# Altium footprint library LDO-DC_DC.PcbLib: 41 footprints (part 1 of 3)
Each footprint in its own frame and in the unit in brackets; x right, y up, seen from the top. Pads: shape width x height; smd on the part's side, far side on the other; paste and mask are expansions set on the pad; w line width, h text height; cw(c..) or ccw(c..) is an arc to the next point about the centre after c.
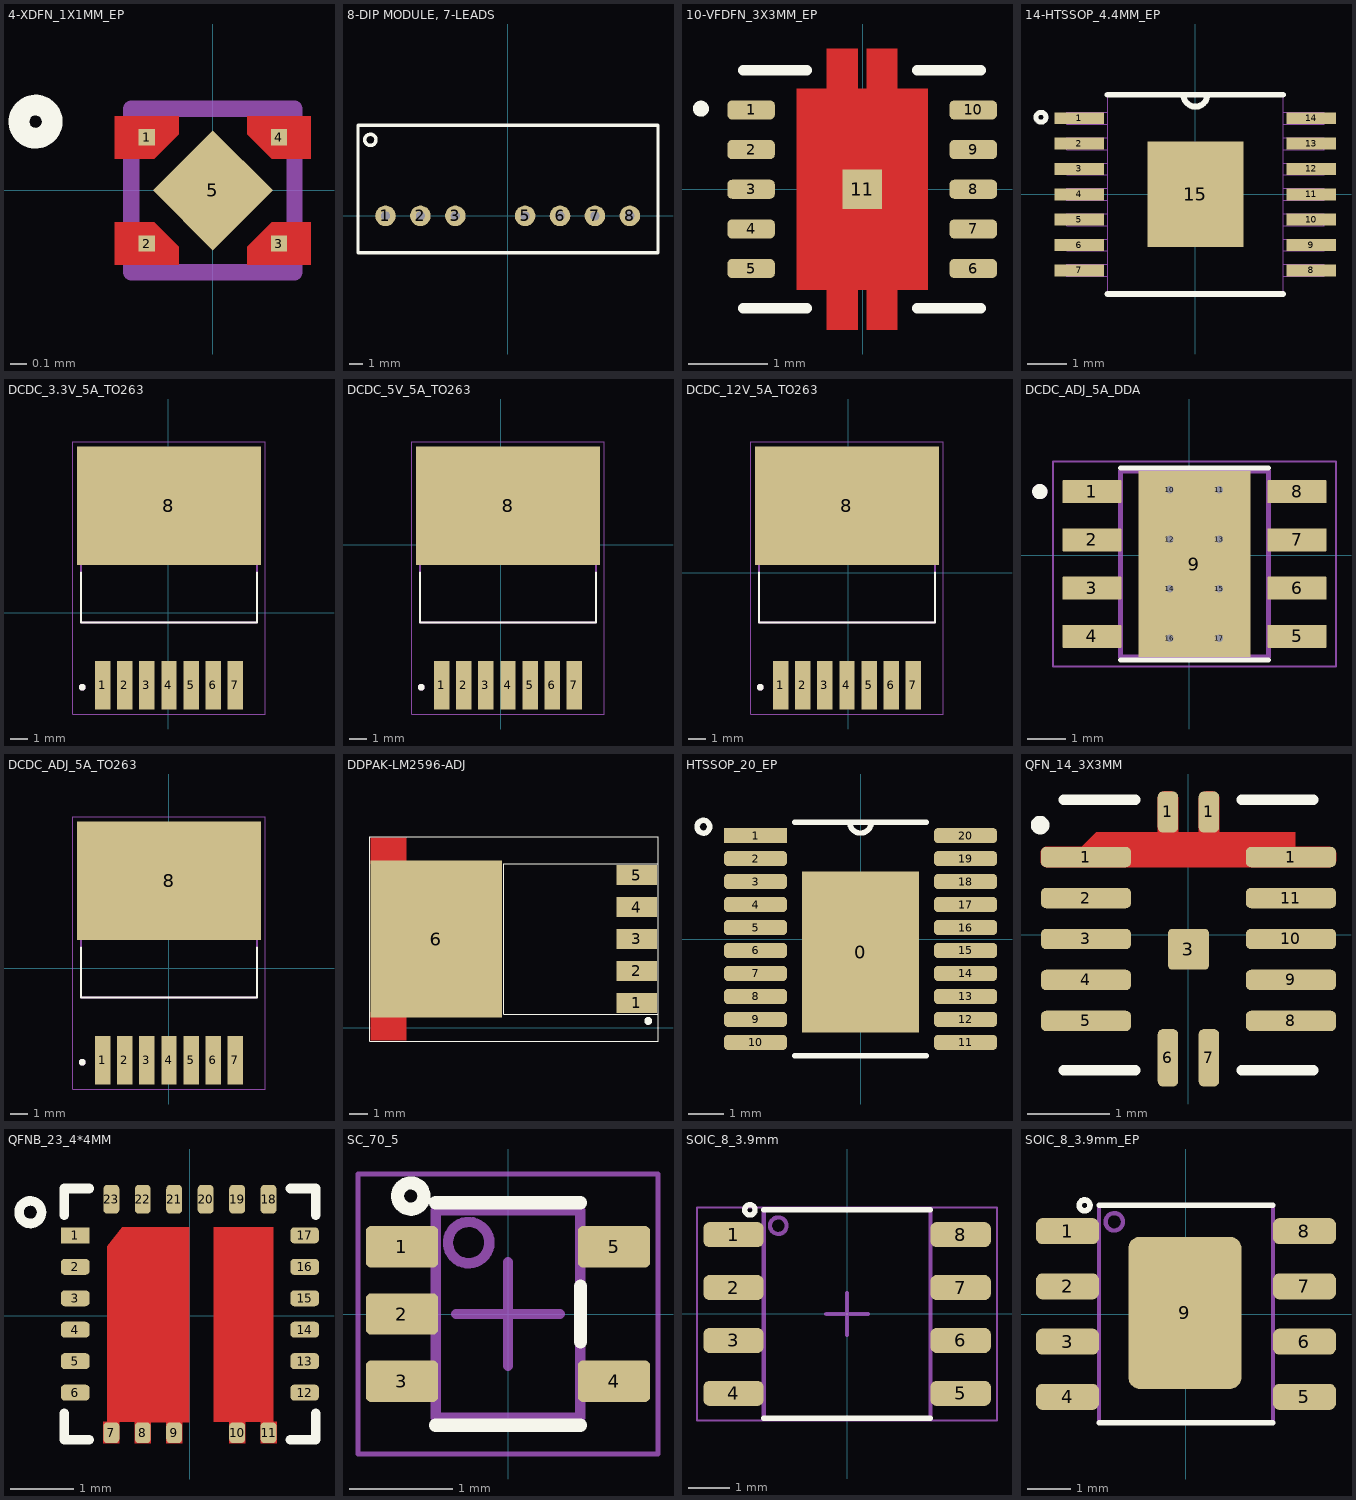
[diagram p0: the footprints below, top view; thin cyan lines are the x and y axes]

## 4-XDFN_1X1MM_EP [mm] "20220103 / A-F.Romo"
pads (5):
  rect 0.1x0.1 smd paste-1 mask+0: 1(-0.405,0.325) 2(-0.405,-0.325) 3(0.405,-0.325) 4(0.405,0.325)
  rect 0.52x0.52 smd rot 45: 5(0,0)
Top Layer:
  region: -0.21,0.345 -0.36,0.195 -0.6,0.195 -0.6,0.455 -0.21,0.455
  region: -0.21,-0.345 -0.21,-0.455 -0.6,-0.455 -0.6,-0.195 -0.36,-0.195
  region: 0.6,-0.455 0.21,-0.455 0.21,-0.345 0.36,-0.195 0.6,-0.195
  region: 0.6,0.195 0.36,0.195 0.21,0.345 0.21,0.455 0.6,0.455
Top Overlay:
  circle w0.127: c-1.085,0.421 r0.102
Top Paste:
  region: -0.21,0.345 -0.36,0.195 -0.6,0.195 -0.6,0.455 -0.21,0.455
  region: -0.21,-0.345 -0.21,-0.455 -0.6,-0.455 -0.6,-0.195 -0.36,-0.195
  region: 0.6,-0.455 0.21,-0.455 0.21,-0.345 0.36,-0.195 0.6,-0.195
  region: 0.6,0.195 0.36,0.195 0.21,0.345 0.21,0.455 0.6,0.455
Top Solder:
  region: -0.16,0.32 -0.335,0.145 -0.65,0.145 -0.65,0.505 -0.16,0.505
  region: -0.16,-0.32 -0.16,-0.505 -0.65,-0.505 -0.65,-0.145 -0.335,-0.145
  region: 0.65,-0.505 0.16,-0.505 0.16,-0.32 0.335,-0.145 0.65,-0.145
  region: 0.65,0.145 0.335,0.145 0.16,0.32 0.16,0.505 0.65,0.505
Mechanical 1:
  lines w0.1: -0.5,-0.5 0.5,-0.5 0.5,0.5 -0.5,0.5 -0.5,-0.5
3D body "step_temp.STEP": height 0.38, standoff -0.05, extent -0.5,-0.5 0.5,0.5

## 8-DIP MODULE, 7-LEADS [mm] "/20220607/F-A.Ospina"
pads (7):
  round 1.5 hole 0.635: 1(-8.89,0) 2(-6.35,0) 3(-3.81,0) 5(1.27,0) 6(3.81,0) 7(6.35,0) 8(8.89,0)
Top Overlay:
  circle w0.254: c-9.988,5.53 r0.408
  lines w0.254: -10.89,-2.7 -10.89,6.6 10.91,6.6 ; -10.87,-2.69 10.93,-2.69 ; 10.94,-2.69 10.94,6.61
3D body: height 2.61, standoff -0.39, extent 8.69,-0.2 9.088,0.2
3D body: height 11.2, standoff 0, extent -10.915,-2.722 10.878,6.575
3D body: height 2.61, standoff -0.39, extent 6.15,-0.2 6.548,0.2
3D body: height 2.61, standoff -0.39, extent 3.61,-0.2 4.008,0.2
3D body: height 2.61, standoff -0.39, extent 1.07,-0.2 1.468,0.2
3D body: height 2.61, standoff -0.39, extent -4.01,-0.2 -3.612,0.2
3D body: height 2.61, standoff -0.39, extent -6.55,-0.2 -6.152,0.2
3D body: height 2.61, standoff -0.39, extent -9.09,-0.2 -8.692,0.2

## 10-VFDFN_3X3MM_EP [mm] "/20210803/J-E.Pachon"
pads (11):
  rrect50% 0.6x0.24 smd: 1(-1.41,1) 2(-1.41,0.5) 3(-1.41,0) 4(-1.41,-0.5) 5(-1.41,-1) 6(1.39,-1) 7(1.39,-0.5) 8(1.39,0) 9(1.39,0.5) 10(1.39,1)
  rect 0.5x0.5 smd paste-1 mask+0: 11(-0.01,0)
Top Layer:
  region: 0.435,1.27 0.815,1.27 0.815,-1.27 0.435,-1.27 0.435,-1.77 0.045,-1.77 0.045,-1.27 -0.065,-1.27 -0.065,-1.77 -0.455,-1.77 -0.455,-1.27 -0.835,-1.27 -0.835,1.27 -0.455,1.27 -0.455,1.77 -0.065,1.77 -0.065,1.27 0.045,1.27 0.045,1.77 0.435,1.77
  region: 0.365,1.2 0.815,1.2 0.815,-1.2 0.365,-1.2 0.365,-1.7 0.115,-1.7 0.115,-1.2 -0.135,-1.2 -0.135,-1.7 -0.385,-1.7 -0.385,-1.2 -0.835,-1.2 -0.835,1.2 -0.385,1.2 -0.385,1.7 -0.135,1.7 -0.135,1.2 0.115,1.2 0.115,1.7 0.365,1.7
Top Overlay:
  circle w0.1: c-2.042,1.016 r0.05
  lines w0.127: -1.51,-1.5 -0.705,-1.5 ; -1.51,1.5 -0.705,1.5 ; 0.685,-1.5 1.49,-1.5 ; 0.685,1.5 1.49,1.5
Top Paste:
  region: -0.135,1.36 -0.385,1.36 -0.385,1.7 -0.135,1.7
  region: 0.365,1.36 0.115,1.36 0.115,1.7 0.365,1.7
  region: -0.135,-1.7 -0.385,-1.7 -0.385,-1.36 -0.135,-1.36
  region: 0.365,-1.7 0.115,-1.7 0.115,-1.36 0.365,-1.36
  region: 0.74,0.1 -0.76,0.1 -0.76,1.16 0.74,1.16
  region: 0.74,-1.16 -0.76,-1.16 -0.76,-0.1 0.74,-0.1
Top Solder:
  region: 0.431,1.277 0.811,1.277 0.811,-1.263 0.431,-1.263 0.431,-1.763 0.041,-1.763 0.041,-1.263 -0.069,-1.263 -0.069,-1.763 -0.459,-1.763 -0.459,-1.263 -0.839,-1.263 -0.839,1.277 -0.459,1.277 -0.459,1.777 -0.069,1.777 -0.069,1.277 0.041,1.277 0.041,1.777 0.431,1.777
3D body "TPS61087DSCR--3DModel-STEP-56544.STEP": height 0.81, standoff 0.01, extent -1.51,-1.5 1.49,1.5

## 14-HTSSOP_4.4MM_EP [mil] "20220111/J-E.Pachon"
pads (15):
  rect 50x12 smd: 1(-117,76.77) 2(-117,51.18) 3(-117,25.59) 4(-117,0) 5(-117,-25.59) 6(-117,-51.18) 7(-117,-76.77) 8(117,-76.77) 9(117,-51.18) 10(117,-25.59) 11(117,0) 12(117,25.59) 13(117,51.18) 14(117,76.77)
  rect 96.85x106.3 smd: 15(0,0)
Top Layer:
  region: 0,45.47
  region: 0,-45.47
Top Overlay:
  circle w5: c-155.91,77.77 r5
  lines w6: -88.5,-100.5 88.5,-100.5 ; -88.5,100.5 88.5,100.5 ; -12,100.5 ccw(c0,100.5) 12,100.5
Top Solder:
  region: 0,45.47
  region: 0,-45.47
Mechanical 13:
  lines w0: -12,100.5 ccw(c0,100.5) 12,100.5
  lines w1: -130,-82.77 -130,-70.77 -88.5,-70.77 -88.5,-82.77 -130,-82.77 ; -130,-57.18 -130,-45.18 -88.5,-45.18 -88.5,-57.18 -130,-57.18 ; -130,-31.59 -130,-19.59 -88.5,-19.59 -88.5,-31.59 -130,-31.59 ; -130,-6 -130,6 -88.5,6 -88.5,-6 -130,-6 ; -130,19.59 -130,31.59 -88.5,31.59 -88.5,19.59 -130,19.59 ; -130,45.18 -130,57.18 -88.5,57.18 -88.5,45.18 -130,45.18 ; -130,70.77 -130,82.77 -88.5,82.77 -88.5,70.77 -130,70.77 ; -88.5,-100.5 88.5,-100.5 88.5,100.5 -88.5,100.5 -88.5,-100.5 ; 88.5,-82.77 88.5,-70.77 130,-70.77 130,-82.77 88.5,-82.77 ; 88.5,-57.18 88.5,-45.18 130,-45.18 130,-57.18 88.5,-57.18 ; 88.5,-31.59 88.5,-19.59 130,-19.59 130,-31.59 88.5,-31.59 ; 88.5,-6 88.5,6 130,6 130,-6 88.5,-6 ; 88.5,19.59 88.5,31.59 130,31.59 130,19.59 88.5,19.59 ; 88.5,45.18 88.5,57.18 130,57.18 130,45.18 88.5,45.18 ; 88.5,70.77 88.5,82.77 130,82.77 130,70.77 88.5,70.77
3D body "PWP14.step": height 67.09, standoff 0, extent -130,-100.52 130,100.5

## DCDC_3.3V_5A_TO263 [mm]
pads (8):
  rect 0.89x2.79 smd: 1(-3.758,-4.194) 2(-2.488,-4.194) 3(-1.218,-4.194) 4(0.052,-4.194) 5(1.322,-4.194) 6(2.592,-4.194) 7(3.862,-4.194)
  rect 10.58x6.84 smd paste-6: 8(0.052,6.156)
Top Overlay:
  circle w0.2: c-4.948,-4.304 r0.1
  lines w0.127: -5.028,2.296 -5.028,-0.579 5.132,-0.579 5.132,2.296
Top Paste:
  region: -0.198,6.911 -1.458,6.911 -1.458,8.821 -0.198,8.821
  region: -0.198,3.491 -1.458,3.491 -1.458,5.401 -0.198,5.401
  region: 1.562,6.911 0.302,6.911 0.302,8.821 1.562,8.821
  region: 1.562,3.491 0.302,3.491 0.302,5.401 1.562,5.401
  region: -1.958,6.911 -3.218,6.911 -3.218,8.821 -1.958,8.821
  region: -3.718,6.911 -4.978,6.911 -4.978,8.821 -3.718,8.821
  region: -1.958,3.491 -3.218,3.491 -3.218,5.401 -1.958,5.401
  region: -3.718,3.491 -4.978,3.491 -4.978,5.401 -3.718,5.401
  region: 3.322,3.491 2.062,3.491 2.062,5.401 3.322,5.401
  region: 3.322,6.911 2.062,6.911 2.062,8.821 3.322,8.821
  region: 5.082,6.911 3.822,6.911 3.822,8.821 5.082,8.821
  region: 5.082,3.491 3.822,3.491 3.822,5.401 5.082,5.401
Mechanical 13:
  circle w0.2: c-4.948,-4.304 r0.1
  lines w0.127: -5.028,-0.579 5.132,-0.579 5.132,8.061 -5.028,8.061 -5.028,-0.579
Mechanical 15:
  lines w0.05: -5.488,-5.844 5.592,-5.844 5.592,9.836 -5.488,9.836 -5.488,-5.844
3D body "step_temp.STEP": height 4.65, standoff -0.3, extent -4.996,-5.624 5.1,9.616

## DCDC_5V_5A_TO263 [mm]
pads (8):
  rect 0.89x2.79 smd: 1(-3.388,-8.095) 2(-2.118,-8.095) 3(-0.848,-8.095) 4(0.422,-8.095) 5(1.692,-8.095) 6(2.962,-8.095) 7(4.232,-8.095)
  rect 10.58x6.84 smd paste-6: 8(0.422,2.255)
Top Overlay:
  circle w0.2: c-4.578,-8.205 r0.1
  lines w0.127: -4.658,-1.605 -4.658,-4.48 5.502,-4.48 5.502,-1.605
Top Paste:
  region: 5.452,-0.41 4.192,-0.41 4.192,1.5 5.452,1.5
  region: 5.452,3.01 4.192,3.01 4.192,4.92 5.452,4.92
  region: 3.692,3.01 2.432,3.01 2.432,4.92 3.692,4.92
  region: 3.692,-0.41 2.432,-0.41 2.432,1.5 3.692,1.5
  region: -3.348,-0.41 -4.608,-0.41 -4.608,1.5 -3.348,1.5
  region: -1.588,-0.41 -2.848,-0.41 -2.848,1.5 -1.588,1.5
  region: -3.348,3.01 -4.608,3.01 -4.608,4.92 -3.348,4.92
  region: -1.588,3.01 -2.848,3.01 -2.848,4.92 -1.588,4.92
  region: 1.932,-0.41 0.672,-0.41 0.672,1.5 1.932,1.5
  region: 1.932,3.01 0.672,3.01 0.672,4.92 1.932,4.92
  region: 0.172,-0.41 -1.088,-0.41 -1.088,1.5 0.172,1.5
  region: 0.172,3.01 -1.088,3.01 -1.088,4.92 0.172,4.92
Mechanical 13:
  circle w0.2: c-4.578,-8.205 r0.1
  lines w0.127: -4.658,-4.48 -4.658,4.16 5.502,4.16 5.502,-4.48 -4.658,-4.48
Mechanical 15:
  lines w0.05: -5.118,-9.745 -5.118,5.935 5.962,5.935 5.962,-9.745 -5.118,-9.745
3D body "step_temp.STEP": height 4.65, standoff -0.3, extent -4.626,-9.525 5.47,5.715

## DCDC_12V_5A_TO263 [mm]
pads (8):
  rect 0.89x2.79 smd: 1(-3.876,-6.503) 2(-2.606,-6.503) 3(-1.336,-6.503) 4(-0.066,-6.503) 5(1.204,-6.503) 6(2.474,-6.503) 7(3.744,-6.503)
  rect 10.58x6.84 smd paste-6: 8(-0.066,3.847)
Top Overlay:
  circle w0.2: c-5.066,-6.613 r0.1
  lines w0.127: -5.146,-0.013 -5.146,-2.888 5.014,-2.888 5.014,-0.013
Top Paste:
  region: 4.964,1.182 3.704,1.182 3.704,3.092 4.964,3.092
  region: 4.964,4.602 3.704,4.602 3.704,6.512 4.964,6.512
  region: 3.204,4.602 1.944,4.602 1.944,6.512 3.204,6.512
  region: 3.204,1.182 1.944,1.182 1.944,3.092 3.204,3.092
  region: -3.836,1.182 -5.096,1.182 -5.096,3.092 -3.836,3.092
  region: -2.076,1.182 -3.336,1.182 -3.336,3.092 -2.076,3.092
  region: -3.836,4.602 -5.096,4.602 -5.096,6.512 -3.836,6.512
  region: -2.076,4.602 -3.336,4.602 -3.336,6.512 -2.076,6.512
  region: 1.444,1.182 0.184,1.182 0.184,3.092 1.444,3.092
  region: 1.444,4.602 0.184,4.602 0.184,6.512 1.444,6.512
  region: -0.316,1.182 -1.576,1.182 -1.576,3.092 -0.316,3.092
  region: -0.316,4.602 -1.576,4.602 -1.576,6.512 -0.316,6.512
Mechanical 13:
  circle w0.2: c-5.066,-6.613 r0.1
  lines w0.127: -5.146,-2.888 -5.146,5.752 5.014,5.752 5.014,-2.888 -5.146,-2.888
Mechanical 15:
  lines w0.05: -5.606,-8.153 -5.606,7.527 5.474,7.527 5.474,-8.153 -5.606,-8.153
3D body "step_temp.STEP": height 4.65, standoff -0.3, extent -5.114,-7.933 4.982,7.307

## DCDC_ADJ_5A_DDA [mm]
pads (17):
  rrect5% 1.55x0.6 smd mask+0: 1(-2.565,1.671) 2(-2.565,0.401) 3(-2.565,-0.869) 4(-2.565,-2.139) 5(2.835,-2.139) 6(2.835,-0.869) 7(2.835,0.401) 8(2.835,1.671)
  rect 2.95x4.9 smd paste-3 mask+0: 9(0.135,-0.234)
  round 0.3 hole 0.2: 10(-0.515,1.716) 11(0.785,1.716) 12(-0.515,0.416) 13(0.785,0.416) 14(-0.515,-0.884) 15(0.785,-0.884) 16(-0.515,-2.184) 17(0.785,-2.184)
Top Overlay:
  circle w0.2: c-3.935,1.671 r0.1
  lines w0.127: -1.815,-2.759 2.085,-2.759 ; -1.815,2.291 2.085,2.291
Top Paste:
  region: 1.49,-1.934 -1.22,-1.934 -1.22,1.466 1.49,1.466
Top Solder:
  drawing of 9 lines, arcs and shapes, not listed
Mechanical 13:
  circle w0.2: c-3.935,1.671 r0.1
  lines w0.127: -1.815,-2.684 -1.815,2.216 2.085,2.216 2.085,-2.684 -1.815,-2.684
Mechanical 15:
  lines w0.05: -3.59,-2.934 -3.59,2.466 3.86,2.466 3.86,-2.934 -3.59,-2.934
3D body "step_temp.STEP": height 1.7, standoff 0, extent -2.865,-2.684 3.135,2.216

## DCDC_ADJ_5A_TO263 [mm]
pads (8):
  rect 0.89x2.79 smd: 1(-3.783,-5.32) 2(-2.513,-5.32) 3(-1.243,-5.32) 4(0.027,-5.32) 5(1.297,-5.32) 6(2.567,-5.32) 7(3.837,-5.32)
  rect 10.58x6.84 smd paste-6: 8(0.027,5.03)
Top Overlay:
  circle w0.2: c-4.973,-5.43 r0.1
  lines w0.127: -5.053,1.17 -5.053,-1.705 5.107,-1.705 5.107,1.17
Top Paste:
  region: 5.057,2.365 3.797,2.365 3.797,4.275 5.057,4.275
  region: 5.057,5.785 3.797,5.785 3.797,7.695 5.057,7.695
  region: 3.297,5.785 2.037,5.785 2.037,7.695 3.297,7.695
  region: 3.297,2.365 2.037,2.365 2.037,4.275 3.297,4.275
  region: -3.743,2.365 -5.003,2.365 -5.003,4.275 -3.743,4.275
  region: -1.983,2.365 -3.243,2.365 -3.243,4.275 -1.983,4.275
  region: -3.743,5.785 -5.003,5.785 -5.003,7.695 -3.743,7.695
  region: -1.983,5.785 -3.243,5.785 -3.243,7.695 -1.983,7.695
  region: 1.537,2.365 0.277,2.365 0.277,4.275 1.537,4.275
  region: 1.537,5.785 0.277,5.785 0.277,7.695 1.537,7.695
  region: -0.223,2.365 -1.483,2.365 -1.483,4.275 -0.223,4.275
  region: -0.223,5.785 -1.483,5.785 -1.483,7.695 -0.223,7.695
Mechanical 13:
  circle w0.2: c-4.973,-5.43 r0.1
  lines w0.127: -5.053,-1.705 -5.053,6.935 5.107,6.935 5.107,-1.705 -5.053,-1.705
Mechanical 15:
  lines w0.05: -5.513,-6.97 -5.513,8.71 5.567,8.71 5.567,-6.97 -5.513,-6.97
3D body "step_temp.STEP": height 4.65, standoff -0.3, extent -5.021,-6.75 5.075,8.49

## DDPAK-LM2596-ADJ [mm] "/ 20231112 / J.Jaramillo"
pads (6):
  rect 2.16x1.07 smd paste-0.102 mask+0.051: 1(16.847,1.32) 2(16.847,3.02) 3(16.847,4.725) 4(16.847,6.42) 5(16.847,8.12)
  rect 6.99x8.33 smd paste-0.102 mask+0.051: 6(6.172,4.72)
Top Layer:
  region: 2.678,10.12 2.678,8.72 4.587,8.72 4.587,10.12
  region: 2.678,0.82 2.678,-0.68 4.587,-0.68 4.587,0.82
Top Overlay:
  circle w0.203: c17.45,0.36 r0.108
  lines w0.051: 17.97,10.17 17.97,-0.731 2.627,-0.731 2.627,10.171 17.97,10.171 ; 9.76,0.72 17.97,0.72 17.97,8.73 9.76,8.73 9.76,0.72
Top Paste:
  region: 2.779,10.018 2.779,8.822 4.486,8.822 4.486,10.018
  region: 2.779,0.718 2.779,-0.578 4.486,-0.578 4.486,0.718
Top Solder:
  region: 2.627,10.171 2.627,8.669 4.638,8.669 4.638,10.171
  region: 2.627,0.871 2.627,-0.731 4.638,-0.731 4.638,0.871
3D body "LM2596S-ADJ_NOPB.STEP": height 4.78, standoff -0.03, extent 3.355,-0.34 17.706,9.82

## HTSSOP_20_EP [mm] "20PTSSOP/20220419/V-A.Patino"
pads (21):
  rect 3.32x4.55 smd: 0(0,-0.37)
  rect 1.78x0.42 smd: 1(-2.97,2.925)
  rrect50% 1.78x0.42 smd: 2(-2.97,2.275) 3(-2.97,1.625) 4(-2.97,0.975) 5(-2.97,0.325) 6(-2.97,-0.325) 7(-2.97,-0.975) 8(-2.97,-1.625) 9(-2.97,-2.275) 10(-2.97,-2.925) 11(2.97,-2.925) 12(2.97,-2.275) 13(2.97,-1.625) 14(2.97,-0.975) 15(2.97,-0.325) 16(2.97,0.325) 17(2.97,0.975) 18(2.97,1.625) 19(2.97,2.275) 20(2.97,2.925)
Top Overlay:
  circle w0.152: c-4.445,3.175 r0.18
  lines w0.152: -1.867,-3.302 1.867,-3.302 ; -1.867,3.302 1.867,3.302 ; -0.305,3.302 ccw(c0,3.302) 0.305,3.302
3D body "PWP0020AA.stp": height 0.98, standoff -0.02, extent -3.21,-3.25 3.21,3.25

## QFN_14_3X3MM [mm] "20220809 / E.Naranjo"
pads (15):
  rrect50% 1.1x0.25 smd mask+0.051: 1(-1.25,0.95) 1(1.25,0.95) 2(-1.25,0.45) 3(-1.25,-0.05) 4(-1.25,-0.55) 5(-1.25,-1.05) 8(1.25,-1.05) 9(1.25,-0.55) 10(1.25,-0.05) 11(1.25,0.45)
  rrect50% 0.25x0.5 smd mask+0.051: 1(-0.25,1.5) 1(0.25,1.5)
  rrect20% 0.5x0.5 smd mask+0.051: 3(0,-0.175)
  rrect50% 0.25x0.7 smd mask+0.051: 6(-0.25,-1.5) 7(0.25,-1.5)
Top Layer:
  region: -1.3,1.075 -1.125,1.25 -0.375,1.25 -0.375,1.656 -0.375,1.674 -0.361,1.709 -0.334,1.736 -0.299,1.75 -0.281,1.75 -0.221,1.75 -0.202,1.75 -0.167,1.735 -0.14,1.708 -0.125,1.673 -0.125,1.654 -0.125,1.25 0.125,1.25 0.125,1.642 0.125,1.663 0.142,1.703 0.172,1.733 0.212,1.75 0.233,1.75 0.288,1.75 0.305,1.75 0.337,1.737 0.362,1.712 0.375,1.68 0.375,1.663 0.375,1.25 1.3,1.25 1.3,1.075 1.712,1.075 1.729,1.075 1.762,1.062 1.787,1.037 1.8,1.004 1.8,0.987 1.8,0.918 1.8,0.9 1.786,0.865 1.76,0.839 1.725,0.825 1.707,0.825 -1.727,0.825 -1.741,0.825 -1.768,0.836 -1.789,0.857 -1.8,0.884 -1.8,0.898 -1.8,1.011 -1.8,1.023 -1.79,1.047 -1.772,1.065 -1.748,1.075 -1.736,1.075
Top Overlay:
  circle w0.127: c-1.81,1.34 r0.05
  lines w0.127: -1.52,-1.65 -0.65,-1.65 ; -1.52,1.65 -0.65,1.65 ; 0.65,-1.65 1.52,-1.65 ; 0.65,1.65 1.52,1.65
Top Paste:
  region: -1.3,1.075 -1.125,1.25 -0.375,1.25 -0.375,1.656 -0.375,1.674 -0.361,1.709 -0.334,1.736 -0.299,1.75 -0.281,1.75 -0.221,1.75 -0.202,1.75 -0.167,1.735 -0.14,1.708 -0.125,1.673 -0.125,1.654 -0.125,1.25 0.125,1.25 0.125,1.642 0.125,1.663 0.142,1.703 0.172,1.733 0.212,1.75 0.233,1.75 0.288,1.75 0.305,1.75 0.337,1.737 0.362,1.712 0.375,1.68 0.375,1.663 0.375,1.25 1.3,1.25 1.3,1.075 1.712,1.075 1.729,1.075 1.762,1.062 1.787,1.037 1.8,1.004 1.8,0.987 1.8,0.918 1.8,0.9 1.786,0.865 1.76,0.839 1.725,0.825 1.707,0.825 -1.727,0.825 -1.741,0.825 -1.768,0.836 -1.789,0.857 -1.8,0.884 -1.8,0.898 -1.8,1.011 -1.8,1.023 -1.79,1.047 -1.772,1.065 -1.748,1.075 -1.736,1.075
Top Solder:
  region: -1.3,1.075 -1.125,1.25 -0.375,1.25 -0.375,1.656 -0.375,1.674 -0.361,1.709 -0.334,1.736 -0.299,1.75 -0.281,1.75 -0.221,1.75 -0.202,1.75 -0.167,1.735 -0.14,1.708 -0.125,1.673 -0.125,1.654 -0.125,1.25 0.125,1.25 0.125,1.642 0.125,1.663 0.142,1.703 0.172,1.733 0.212,1.75 0.233,1.75 0.288,1.75 0.305,1.75 0.337,1.737 0.362,1.712 0.375,1.68 0.375,1.663 0.375,1.25 1.3,1.25 1.3,1.075 1.712,1.075 1.729,1.075 1.762,1.062 1.787,1.037 1.8,1.004 1.8,0.987 1.8,0.918 1.8,0.9 1.786,0.865 1.76,0.839 1.725,0.825 1.707,0.825 -1.727,0.825 -1.741,0.825 -1.768,0.836 -1.789,0.857 -1.8,0.884 -1.8,0.898 -1.8,1.011 -1.8,1.023 -1.79,1.047 -1.772,1.065 -1.748,1.075 -1.736,1.075
3D body "MP2229 ?21V, 6A SYNCHRONOUS STEP-DOWN CONVERTER.stp": height 0.91, standoff -0.01, extent -1.473,-1.527 1.477,1.423

## QFNB_23_4*4MM [mil] "23-PTQFN/20220419/V-A.Patino"
pads (23):
  rect 18x10 smd: 1(-71.85,50.5)
  rrect50% 18x10 smd: 2(-71.85,30.8) 3(-71.85,11.1) 4(-71.85,-8.6) 5(-71.85,-28.3) 6(-71.85,-48) 12(71.85,-48) 13(71.85,-28.3) 14(71.85,-8.6) 15(71.85,11.1) 16(71.85,30.8) 17(71.85,50.5)
  rrect50% 10x13 smd: 7(-49.25,-73.1) 8(-29.55,-73.1) 9(-9.85,-73.1) 10(29.55,-73.1) 11(49.25,-73.1)
  rrect50% 10x18 smd: 18(49.25,73.1) 19(29.55,73.1) 20(9.85,73.1) 21(-9.85,73.1) 22(-29.55,73.1) 23(-49.25,73.1)
Top Layer:
  region: 14.85,55.7 14.85,-66.3 24.55,-66.3 24.55,-79.6 34.55,-79.6 34.55,-66.3 44.25,-66.3 44.25,-79.6 54.25,-79.6 54.25,-66.3 52.25,-66.3 52.25,55.7
  region: -0.4,55.7 -42.5,55.7 -51.85,43.75 -51.85,-66.3 -54.25,-66.3 -54.25,-79.6 -44.25,-79.6 -44.25,-66.6 -34.55,-66.3 -34.55,-79.6 -24.55,-79.6 -24.55,-66.6 -14.85,-66.6 -14.85,-79.6 -4.85,-79.6 -4.85,-66.6 -0.4,-66.6
Top Overlay:
  circle w6: c-100,65 r7.07
  lines w6: -78.74,-61.02 -78.74,-77.64 -62.99,-77.64 ; -78.74,62.99 -78.74,79.84 -62.99,79.84 ; 62.99,-77.64 78.74,-77.64 78.74,-61.02 ; 62.99,79.84 78.74,79.84 78.74,62.99
Top Paste:
  region: 14.85,55.7 14.85,-66.3 24.55,-66.3 24.55,-79.6 34.55,-79.6 34.55,-66.3 44.25,-66.3 44.25,-79.6 54.25,-79.6 54.25,-66.3 52.25,-66.3 52.25,55.7
  region: -0.4,55.7 -42.5,55.7 -51.85,43.75 -51.85,-66.3 -54.25,-66.3 -54.25,-79.6 -44.25,-79.6 -44.25,-66.6 -34.55,-66.3 -34.55,-79.6 -24.55,-79.6 -24.55,-66.6 -14.85,-66.6 -14.85,-79.6 -4.85,-79.6 -4.85,-66.6 -0.4,-66.6
Top Solder:
  region: -0.4,55.7 -42.5,55.7 -51.85,43.75 -51.85,-66.3 -54.25,-66.3 -54.25,-79.6 -44.25,-79.6 -44.25,-66.6 -34.55,-66.3 -34.55,-79.6 -24.55,-79.6 -24.55,-66.6 -14.85,-66.6 -14.85,-79.6 -4.85,-79.6 -4.85,-66.6 -0.4,-66.6
  region: 14.85,55.7 14.85,-66.3 24.55,-66.3 24.55,-79.6 34.55,-79.6 34.55,-66.3 44.25,-66.3 44.25,-79.6 54.25,-79.6 54.25,-66.3 52.25,-66.3 52.25,55.7
3D body: height 35.43, standoff 0, extent -78.74,-77.64 78.74,79.84

## SC_70_5 [mm] "TSSOP5, SOT-353 / 20190221 / H-D.Garcia"
height 1.1
pads (5):
  rrect25% 0.7x0.4 smd: 1(-1.025,0.65) 2(-1.025,0) 3(-1.025,-0.65) 4(1.025,-0.65) 5(1.025,0.65)
Top Overlay:
  circle w0.127: c-0.94,1.14 r0.127
  lines w0.127: -0.7,-1.075 0.7,-1.075 ; -0.7,1.075 0.7,1.075 ; 0.7,-0.27 0.7,0.27
Mechanical 1:
  circle w0.1: c-0.38,0.69 r0.2
  lines w0.1: -0.7,-1 -0.7,1 0.7,1 0.7,-1 -0.7,-1
Mechanical 15:
  lines w0.05: -1.45,-1.355 1.45,-1.355 1.45,1.355 -1.45,1.355 -1.45,-1.355
  lines w0.1: -0.5,0 0.5,0 ; 0,-0.5 0,0.5
3D body "DCK0005AakaMAA05A.stp": height 0.94, standoff -0.01, extent -1.14,-1 1.14,1

## SOIC_8_3.9mm [mm] "/20210511/C-A.Serna.A"
pads (8):
  rrect50% 1.45x0.6 smd: 1(-2.725,1.905) 2(-2.725,0.635) 3(-2.725,-0.635) 4(-2.725,-1.905) 5(2.725,-1.905) 6(2.725,-0.635) 7(2.725,0.635) 8(2.725,1.905)
Top Overlay:
  circle w0.127: c-2.332,2.499 r0.125
  lines w0.127: -2,-2.5 2,-2.5 ; -2,2.5 2,2.5
Mechanical 1:
  circle w0.1: c-1.65,2.12 r0.2
  lines w0.1: -2,-2.5 -2,2.5 2,2.5 2,-2.5 -2,-2.5
Mechanical 15:
  lines w0.05: -3.601,-2.555 -3.601,2.555 3.599,2.555 3.599,-2.555 -3.601,-2.555
  lines w0.1: -0.5,0 0.5,0 ; 0,-0.5 0,0.5
3D body "User Library-sop8_model.STEP": height 1.57, standoff 0.01, extent -2.941,-2.462 3.039,2.438

## SOIC_8_3.9mm_EP [mm] "SOP-8-EP / 20240420 / J.Jaramillo"
pads (9):
  rrect50% 1.45x0.6 smd: 1(-2.725,1.905) 2(-2.725,0.635) 3(-2.725,-0.635) 4(-2.725,-1.905) 5(2.725,-1.905) 6(2.725,-0.635) 7(2.725,0.635) 8(2.725,1.905)
  rrect20% 2.6x3.5 smd: 9(-0.025,0.025)
Top Overlay:
  circle w0.127: c-2.332,2.499 r0.125
  lines w0.127: -2,-2.5 2,-2.5 ; -2,2.5 2,2.5
Mechanical 1:
  circle w0.1: c-1.65,2.12 r0.2
  lines w0.1: -2,-2.5 2,-2.5 2,2.5 -2,2.5 -2,-2.5
3D body "User Library-sop8_model.STEP": height 1.57, standoff 0.01, extent -2.941,-2.462 3.039,2.438